# Altium footprint library tp_via_1mm_smd.PcbLib: 1 footprints
Each footprint in its own frame and in the unit in brackets; x right, y up, seen from the top. Pads: shape width x height; smd on the part's side, far side on the other; paste and mask are expansions set on the pad; w line width, h text height; cw(c..) or ccw(c..) is an arc to the next point about the centre after c.
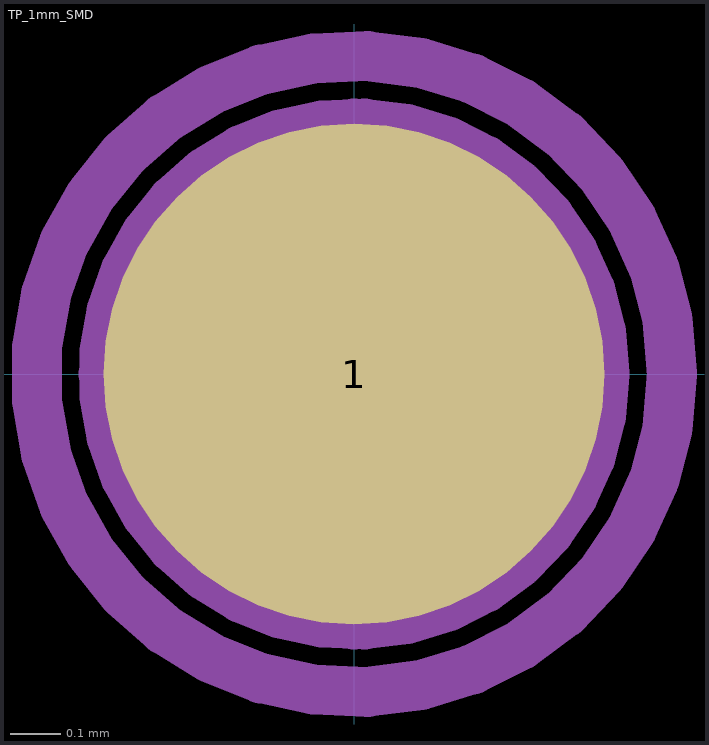
[diagram p0: the footprint, top view; thin cyan lines are the x and y axes]

## TP_1mm_SMD [mm]
height 0.1
pads (1):
  round 1 smd paste-1: 1(0,0)
Assy TOP (M11):
  circle w0.1: c0,0 r0.5
Guard TOP (M15):
  circle w0.1: c0,0 r0.635
  lines w0.1: -0.5,0 0.5,0 ; 0,-0.5 0,0.5